# Altium footprint library DIM.PcbLib: 183 footprints (part 4 of 12)
Each footprint in its own frame and in the unit in brackets; x right, y up, seen from the top. Pads: shape width x height; smd on the part's side, far side on the other; paste and mask are expansions set on the pad; w line width, h text height; cw(c..) or ccw(c..) is an arc to the next point about the centre after c.
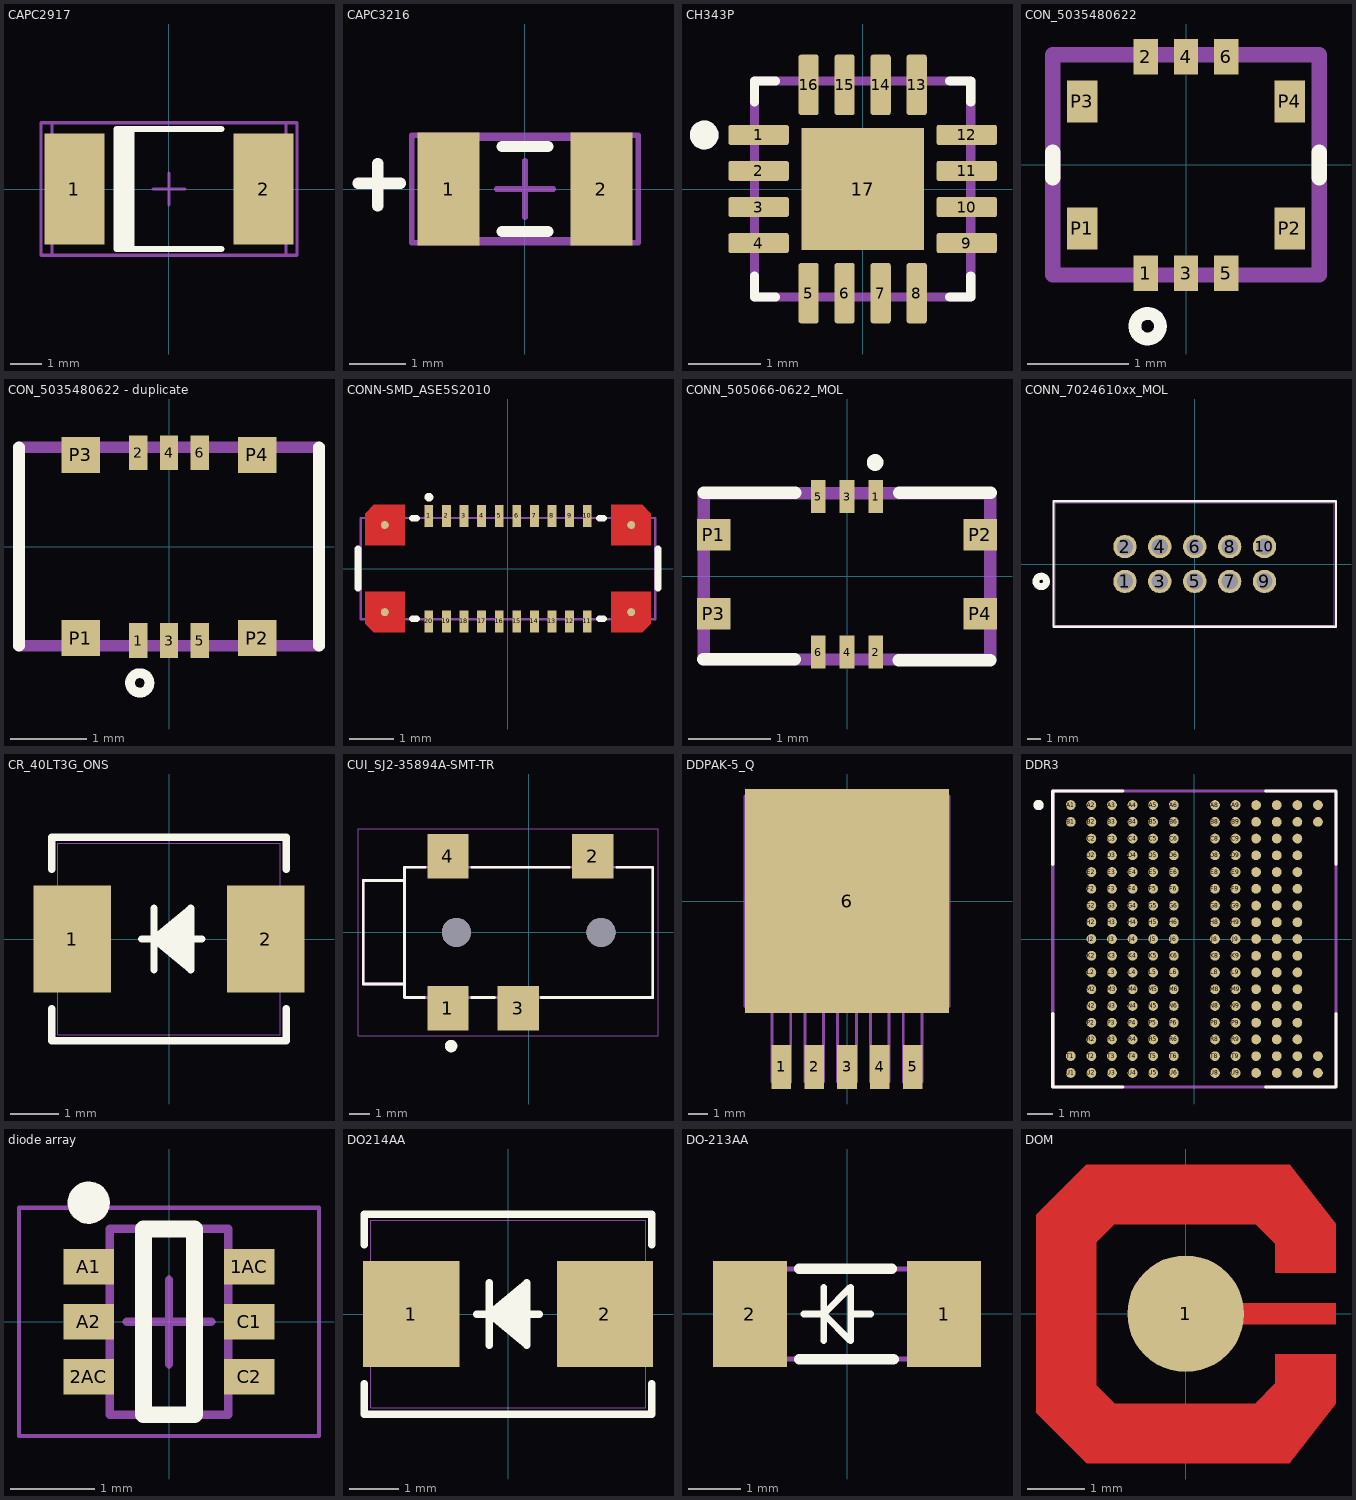
[diagram p3: the footprints below, top view; thin cyan lines are the x and y axes]

## CAPC2917 [mm]
height 4.3
pads (2):
  rect 1.9x3.5 smd: 1(-3,0) 2(3,0)
Top Overlay:
  rectangle: -1.65,-1.9 -1.1,1.9
  lines w0.2: 1.65,-1.9 -1.65,-1.9 -1.65,1.9 1.65,1.9
Mechanical 13:
  lines w0.1: -3.7,-2.1 3.7,-2.1 3.7,2 3.7,2.1 -3.7,2.1 -3.7,-2.1
Mechanical 15:
  lines w0.1: -0.5,0 0.5,0 ; 0,-0.5 0,0.5 ; -4.05,-2.1 4.05,-2.1 4.05,2.1 -4.05,2.1 -4.05,-2.1
3D body: height 4.3, standoff 0, extent -3.8,-2.1 3.8,2.1

## CAPC3216 [mm] "Chip Capacitor, Body 3.2x1.6mm, IPC High Density"
height 1.35
pads (2):
  rect 1.1x2 smd: 1(-1.35,0) 2(1.35,0)
Top Overlay:
  lines w0.2: -2.95,0.1 -2.2,0.1 ; -2.6,-0.3 -2.6,0.45 ; -0.4,-0.75 0.4,-0.75 ; -0.4,0.75 0.4,0.75
Mechanical 13:
  lines w0.1: -1.7,-0.9 -1.7,0.9 1.7,0.9 1.7,-0.9 -1.7,-0.9
Mechanical 15:
  lines w0.1: -0.5,0 0.5,0 ; 0,-0.5 0,0.5 ; -2,-0.95 -2,0.95 2,0.95 2,-0.95 -2,-0.95
3D body "User Library-Chip Capacitor2.STEP": height 1.6, standoff 0, extent -1.6,-0.635 1.6,0.615

## CH343P [mm]
height 0.8
pads (17):
  rrect25% 0.84x0.28 smd mask+0.05: 1(-1.445,0.75) 2(-1.445,0.25) 3(-1.445,-0.25) 4(-1.445,-0.75) 9(1.445,-0.75) 10(1.445,-0.25) 11(1.445,0.25) 12(1.445,0.75)
  rrect25% 0.28x0.84 smd mask+0.05: 5(-0.75,-1.445) 6(-0.25,-1.445) 7(0.25,-1.445) 8(0.75,-1.445) 13(0.75,1.445) 14(0.25,1.445) 15(-0.25,1.445) 16(-0.75,1.445)
  rect 1.7x1.7 smd paste-0.31 mask+0.05: 17(0,0)
Top Overlay:
  circle w0.2: c-2.2,0.75 r0.1
  lines w0.127: -1.5,-1.21 -1.5,-1.5 -1.21,-1.5 ; -1.5,1.21 -1.5,1.5 -1.21,1.5 ; 1.21,-1.5 1.5,-1.5 1.5,-1.21 ; 1.21,1.5 1.5,1.5 1.5,1.21
Mechanical 13:
  circle w0.2: c-2.2,0.75 r0.1
  lines w0.127: -1.5,-1.5 1.5,-1.5 1.5,1.5 -1.5,1.5 -1.5,-1.5
3D body: height 1, standoff 0, extent -1.5,-1.5 1.5,1.5

## CON_5035480622 [mm]
pads (10):
  rect 0.24x0.35 smd: 1(-0.4,-1.075) 2(-0.4,1.075) 3(0,-1.075) 4(0,1.075) 5(0.4,-1.075) 6(0.4,1.075)
  rect 0.3x0.42 smd: P1(-1.03,-0.63) P2(1.03,-0.63) P3(-1.03,0.63) P4(1.03,0.63)
Top Overlay:
  circle w0.127: c-0.381,-1.6 r0.127
  lines w0.152: -1.321,-0.127 -1.321,0.127 ; 1.321,-0.127 1.321,0.127
Mechanical 13:
  lines w0.152: -1.321,-1.092 1.321,-1.092 1.321,1.092 -1.321,1.092 -1.321,-1.092
3D body "5035520622.stp": height 0.56, standoff -0.02, extent -1.339,-1.108 1.321,1.092

## CON_5035480622 - duplicate [mm]
pads (10):
  rect 0.24x0.45 smd: 1(-0.4,-1.225) 2(-0.4,1.225) 3(0,-1.225) 4(0,1.225) 5(0.4,-1.225) 6(0.4,1.225)
  rect 0.5x0.47 smd: P1(-1.15,-1.195) P2(1.15,-1.195) P3(-1.15,1.195) P4(1.15,1.195)
Top Overlay:
  circle w0.127: c-0.381,-1.778 r0.127
  lines w0.152: -1.956,-1.295 -1.956,1.295 ; 1.956,-1.295 1.956,1.295
Mechanical 13:
  lines w0.152: -1.956,-1.295 -1.956,1.295 1.956,1.295 1.956,-1.295 -1.956,-1.295
3D body "5035480622.STEP": height 0.78, standoff 0, extent -1.944,-1.305 1.956,1.295

## CONN-SMD_ASE5S2010 [mm]
pads (24):
  rect 0.2x0.5 smd paste+0 mask+0.05: 1(-1.8,1.2) 2(-1.4,1.2) 3(-1,1.2) 4(-0.6,1.2) 5(-0.2,1.2) 6(0.2,1.2) 7(0.6,1.2) 8(1,1.2) 9(1.4,1.2) 10(1.8,1.2) 11(1.8,-1.2) 12(1.4,-1.2) 13(1,-1.2) 14(0.6,-1.2) 15(0.2,-1.2) 16(-0.2,-1.2) 17(-0.6,-1.2) 18(-1,-1.2) 19(-1.4,-1.2) 20(-1.8,-1.2)
  round 0.18 smd: 21(2.8,0.99) 22(2.8,-0.99) 23(-2.8,-0.99) 24(-2.8,0.99)
Top Layer:
  region: -2.35,1.45 -2.35,0.99 -2.35,0.53 -3.25,0.53 -3.25,1.25 -3.05,1.45
  region: -2.35,-1.45 -3.05,-1.45 -3.25,-1.25 -3.25,-0.53 -2.35,-0.53 -2.35,-0.99
  region: 2.35,1.45 3.05,1.45 3.25,1.25 3.25,0.53 2.35,0.53 2.35,0.99
  region: 2.35,-1.45 2.35,-0.99 2.35,-0.53 3.25,-0.53 3.25,-1.25 3.05,-1.45
Top Overlay:
  circle w0.127: c-1.798,1.623 r0.036
  lines w0.152: -3.41,-0.45 -3.41,0.45 ; -2.17,-1.143 -2.08,-1.143 ; -2.17,1.143 -2.08,1.143 ; 2.08,-1.143 2.17,-1.143 ; 2.08,1.143 2.17,1.143 ; 3.41,-0.45 3.41,0.45
Mechanical 13:
  lines w0.051: -3.35,-1.15 -3.35,1.15 3.35,1.15 3.35,-1.15 -3.35,-1.15
3D body: height 2, standoff 0, extent -3.35,-1.15 3.35,1.15

## CONN_505066-0622_MOL [mil]
pads (10):
  rect 7x16 smd: 1(13.78,38.4) 2(13.78,-36.4) 3(0,38.4) 4(0,-36.4) 5(-13.78,38.4) 6(-13.78,-36.4)
  rect 16x15 smd: P1(-64.17,20) P2(64.17,20) P3(-64.17,-18) P4(64.17,-18)
Top Overlay:
  circle w5: c13.5,54.8 r1.5
  lines w6: -69.2,-39.9 -25.2,-39.9 ; -69,40.2 -25,40.2 ; 25,-40.3 69,-40.3 ; 25.2,40.2 69.2,40.2
Mechanical 13:
  lines w6: -69,-40 -69,40 69,40 69,-40 -69,-40
3D body "step_temp.STEP": height 22.83, standoff 0, extent -68.9,-39.37 68.9,39.37

## CONN_7024610xx_MOL [mil]
pads (10):
  round 67 / inner round 60 / far side round 67 hole 47 paste-33.5 mask+0: 1(-200,-50) 2(-200,50) 3(-100,-50) 4(-100,50) 5(0,-50) 6(0,50) 7(100,-50) 8(100,50) 9(200,-50) 10(200,50)
Top Overlay:
  circle w20: c-440,-50 r15
  lines w6: -405,-180 -405,180 405,180 405,-180 -405,-180
Bottom Overlay:
  circle w20: c-440,-50 r15
Mechanical 13:
  circle w20: c-200,-50 r15
  lines w1: -400,-175 -400,175 400,175 400,-175 -400,-175
3D body "702461004.stp": height 376.18, standoff -123.78, extent -399.99,-174.99 400.01,175

## CR_40LT3G_ONS [mil]
pads (2):
  rect 63x87 smd paste+0 mask+4: 1(-78.74,0) 2(78.74,0)
Top Overlay:
  lines w6: -95.5,-56.6 -95.5,-83 95.5,-83 95.5,-56.6 ; -95.5,56.6 -95.5,83 95.5,83 95.5,56.6 ; -22.24,0 26.66,0 ; -12.24,-25 -12.24,25 ; 17.76,-20 -12.24,0 ; 17.76,-15 -12.24,0 ; 17.76,-10 -12.24,0 ; 17.76,-5 -12.24,0 ; 17.76,5 -12.24,0 ; 17.76,10 -12.24,0 ; 17.76,15 -12.24,0 ; 17.76,20 -12.24,0 ; -12.24,0 17.76,25 17.76,-25 -12.24,0
Mechanical 13:
  lines w1: -22.24,0 27.76,0 ; -12.24,-25 -12.24,25 ; 17.76,-25 -12.24,0 ; 17.76,-20 -12.24,0 ; 17.76,-15 -12.24,0 ; 17.76,-10 -12.24,0 ; 17.76,-5 -12.24,0 ; 17.76,5 -12.24,0 ; 17.76,10 -12.24,0 ; 17.76,15 -12.24,0 ; 17.76,20 -12.24,0 ; 17.76,25 -12.24,0 ; -90.5,-78 90.5,-78 90.5,78 -90.5,78 -90.5,-78
3D body "CR_40LT3G_ONS.step": height 99.02, standoff 0, extent -90.51,-77.99 90.51,77.99

## CUI_SJ2-35894A-SMT-TR [mm]
pads (6):
  rect 2x2.15 smd: 1(-3.9,-3.675) 2(3.1,3.675) 3(-0.5,-3.675) 4(-3.9,3.675)
  round 1.4 hole 1.4 unplated: ""(-3.5,0) ""(3.5,0)
Top Overlay:
  circle w0.3: c-3.75,-5.5 r0.15
  lines w0.127: -5.05,-3.15 -6,-3.15 -6,-2.5 ; -5,3.15 -6,3.15 -6,2.5 ; -2.75,-3.15 -1.65,-3.15 ; -2.75,3.15 1.95,3.15 ; 0.6,-3.15 6,-3.15 6,3.15 4.25,3.15 ; -6,-2.5 -8,-2.5 -8,2.5 -6,2.5 ; -6,-2.5 -6,2.5
Mechanical 13:
  lines w0.127: -6,-2.5 -8,-2.5 -8,2.5 -6,2.5 ; -6,-3.15 -6,3.15 6,3.15 6,-3.15 -6,-3.15
Mechanical 15:
  lines w0.05: -8.25,-5 6.25,-5 6.25,5 -8.25,5 -8.25,-5

## DDPAK-5_Q [mil]
pads (6):
  rect 40x90 smd: 1(-134,-339) 2(-67,-339) 3(0,-339) 4(67,-339) 5(134,-339)
  rect 417x458 smd: 6(0,0)
Mechanical 13:
  lines w6: -208,-215 -208,215 208,215 208,-215 -208,-215 ; -153,-370 -115,-370 -115,-215 -153,-215 -153,-370 ; -86,-370 -48,-370 -48,-215 -86,-215 -86,-370 ; -19,-370 19,-370 19,-215 -19,-215 -19,-370 ; 48,-370 86,-370 86,-215 48,-215 48,-370 ; 115,-370 153,-370 153,-215 115,-215 115,-370

## DDR3 [mm]
pads (178):
  round 0.38 smd: A1(-4.8,5.2) A2(-4,5.2) A3(-3.2,5.2) A4(-2.4,5.2) A5(-1.6,5.2) A6(-0.8,5.2) A8(0.8,5.2) A9(1.6,5.2) A10(2.4,5.2) A11(3.2,5.2) A12(4,5.2) A13(4.8,5.2) B1(-4.8,4.55) B2(-4,4.55) B3(-3.2,4.55) B4(-2.4,4.55) B5(-1.6,4.55) B6(-0.8,4.55) B8(0.8,4.55) B9(1.6,4.55) B10(2.4,4.55) B11(3.2,4.55) B12(4,4.55) B13(4.8,4.55) C2(-4,3.9) C3(-3.2,3.9) C4(-2.4,3.9) C5(-1.6,3.9) C6(-0.8,3.9) C8(0.8,3.9) C9(1.6,3.9) C10(2.4,3.9) C11(3.2,3.9) C12(4,3.9) D2(-4,3.25) D3(-3.2,3.25) D4(-2.4,3.25) D5(-1.6,3.25) D6(-0.8,3.25) D8(0.8,3.25) D9(1.6,3.25) D10(2.4,3.25) D11(3.2,3.25) D12(4,3.25) E2(-4,2.6) E3(-3.2,2.6) E4(-2.4,2.6) E5(-1.6,2.6) E6(-0.8,2.6) E8(0.8,2.6) E9(1.6,2.6) E10(2.4,2.6) E11(3.2,2.6) E12(4,2.6) F2(-4,1.95) F3(-3.2,1.95) F4(-2.4,1.95) F5(-1.6,1.95) F6(-0.8,1.95) F8(0.8,1.95) F9(1.6,1.95) F10(2.4,1.95) F11(3.2,1.95) F12(4,1.95) G2(-4,1.3) G3(-3.2,1.3) G4(-2.4,1.3) G5(-1.6,1.3) G6(-0.8,1.3) G8(0.8,1.3) G9(1.6,1.3) G10(2.4,1.3) G11(3.2,1.3) G12(4,1.3) H2(-4,0.65) H3(-3.2,0.65) H4(-2.4,0.65) H5(-1.6,0.65) H6(-0.8,0.65) H8(0.8,0.65) H9(1.6,0.65) H10(2.4,0.65) H11(3.2,0.65) H12(4,0.65) J2(-4,0) J3(-3.2,0) J4(-2.4,0) J5(-1.6,0) J6(-0.8,0) J8(0.8,0) J9(1.6,0) J10(2.4,0) J11(3.2,0) J12(4,0) K2(-4,-0.65) K3(-3.2,-0.65) K4(-2.4,-0.65) K5(-1.6,-0.65) K6(-0.8,-0.65) K8(0.8,-0.65) K9(1.6,-0.65) K10(2.4,-0.65) K11(3.2,-0.65) K12(4,-0.65) L2(-4,-1.3) L3(-3.2,-1.3) L4(-2.4,-1.3) L5(-1.6,-1.3) L6(-0.8,-1.3) L8(0.8,-1.3) L9(1.6,-1.3) L10(2.4,-1.3) L11(3.2,-1.3) L12(4,-1.3) M2(-4,-1.95) M3(-3.2,-1.95) M4(-2.4,-1.95) M5(-1.6,-1.95) M6(-0.8,-1.95) M8(0.8,-1.95) M9(1.6,-1.95) M10(2.4,-1.95) M11(3.2,-1.95) M12(4,-1.95) N2(-4,-2.6) N3(-3.2,-2.6) N4(-2.4,-2.6) N5(-1.6,-2.6) N6(-0.8,-2.6) N8(0.8,-2.6) N9(1.6,-2.6) N10(2.4,-2.6) N11(3.2,-2.6) N12(4,-2.6) P2(-4,-3.25) P3(-3.2,-3.25) P4(-2.4,-3.25) P5(-1.6,-3.25) P6(-0.8,-3.25) P8(0.8,-3.25) P9(1.6,-3.25) P10(2.4,-3.25) P11(3.2,-3.25) P12(4,-3.25) R2(-4,-3.9) R3(-3.2,-3.9) R4(-2.4,-3.9) R5(-1.6,-3.9) R6(-0.8,-3.9) R8(0.8,-3.9) R9(1.6,-3.9) R10(2.4,-3.9) R11(3.2,-3.9) R12(4,-3.9) T1(-4.8,-4.55) T2(-4,-4.55) T3(-3.2,-4.55) T4(-2.4,-4.55) T5(-1.6,-4.55) T6(-0.8,-4.55) T8(0.8,-4.55) T9(1.6,-4.55) T10(2.4,-4.55) T11(3.2,-4.55) T12(4,-4.55) T13(4.8,-4.55) U1(-4.8,-5.2) U2(-4,-5.2) U3(-3.2,-5.2) U4(-2.4,-5.2) U5(-1.6,-5.2) U6(-0.8,-5.2) U8(0.8,-5.2) U9(1.6,-5.2) U10(2.4,-5.2) U11(3.2,-5.2) U12(4,-5.2) U13(4.8,-5.2)
Top Overlay:
  circle w0.2: c-6.05,5.2 r0.1
  lines w0.127: -5.5,-2.9 -5.5,-5.75 -2.775,-5.75 ; -5.5,2.9 -5.5,5.75 -2.775,5.75 ; 2.775,-5.75 5.5,-5.75 5.5,-2.9 ; 2.775,5.75 5.5,5.75 5.5,2.9
Mechanical 13:
  circle w0.2: c-6.05,5.2 r0.1
  lines w0.127: -5.5,-5.75 5.5,-5.75 5.5,5.75 -5.5,5.75 -5.5,-5.75

## diode array [mm]
height 1
pads (6):
  rect 0.6x0.42 smd: 1AC(0.95,0.65) 2AC(-0.95,-0.65) A1(-0.95,0.65) A2(-0.95,0) C1(0.95,0) C2(0.95,-0.65)
Top Overlay:
  circle w0.25: c-0.95,1.41 r0.125
  lines w0.2: -0.3,-1.1 -0.3,1.1 0.3,1.1 0.3,-1.1 -0.3,-1.1
Mechanical 13:
  lines w0.1: -0.7,-1.1 -0.7,1.1 0.7,1.1 0.7,-1.1 -0.7,-1.1
Mechanical 15:
  lines w0.05: -1.775,-1.35 -1.775,1.35 1.775,1.35 1.775,-1.35 -1.775,-1.35
  lines w0.1: -0.5,0 0.5,0 ; 0,-0.5 0,0.5
3D body: height 1, standoff 0.1, extent -0.7,-1.1 0.7,1.1

## DO214AA [mil]
pads (2):
  rect 77x85 smd paste+0 mask+4: 1(-77.5,0) 2(77.5,0)
Top Overlay:
  lines w6: -115,-55.6 -115,-80 115,-80 115,-55.6 ; -115,55.6 -115,80 115,80 115,55.6 ; -25,0 25,0 ; -15,-25 -15,25 ; 15,-20 -15,0 ; 15,-15 -15,0 ; 15,-10 -15,0 ; 15,-5 -15,0 ; 15,5 -15,0 ; 15,10 -15,0 ; 15,15 -15,0 ; 15,20 -15,0 ; -15,0 15,-25 15,25 -15,0
Mechanical 13:
  lines w1: -25,0 25,0 ; -15,-25 -15,25 ; 15,-20 -15,0 ; 15,-15 -15,0 ; 15,-10 -15,0 ; 15,-5 -15,0 ; 15,5 -15,0 ; 15,10 -15,0 ; 15,15 -15,0 ; 15,20 -15,0 ; -15,0 15,-25 15,25 -15,0 ; -110,-75 -110,75 110,75 110,-75 -110,-75
3D body "DIODE_DO214AA_MBRS_VIS.step": height 95.98, standoff 0, extent -110,-75 110,75

## DO-213AA [mm]
pads (2):
  rect 1.4x2 smd: 1(1.84,0) 2(-1.84,0)
Top Overlay:
  lines w0.127: -0.82,0 -0.439,0 ; -0.439,0.508 -0.439,0 ; 0.069,0 0.45,0 ; -0.439,0 0.069,0.508 0.069,-0.508 -0.439,0 ; -0.439,0 -0.439,-0.508 -0.439,0
  lines w0.2: -0.9,-0.86 0.88,-0.86 ; -0.9,0.86 0.85,0.86
Mechanical 13:
  lines w0.1: -1.855,-0.85 -1.855,0.85 1.855,0.85 1.855,-0.85 -1.855,-0.85
3D body: height 1.6, standoff 0.1, extent 1.46,-0.748 1.86,0.747
3D body: height 1.6, standoff -0.1, extent -1.84,-0.847 -1.44,0.847
3D body: height 1.5, standoff 0, extent -1.49,-0.73 1.51,0.764

## DOM [mm]
pads (1):
  round 2.03 smd mask+0.051: 1(0,0)
Top Layer:
  rectangle: 0.73,-0.19 2.61,0.19
  rectangle: 1.55,0.71 2.61,1.224
  rectangle: 1.55,-1.214 2.61,-0.7
  region: 2.61,1.22 2.61,1.565 1.803,2.59 1.205,1.565 1.55,1.22
  region: 1.803,-1.56 -1.234,-1.56 -1.55,-1.244 -1.55,1.244 -1.244,1.55 1.803,1.55 1.803,2.59 -1.728,2.59 -2.6,1.718 -2.6,-1.718 -1.718,-2.6 1.803,-2.6
  region: 2.61,-1.22 2.61,-1.565 1.803,-2.59 1.205,-1.565 1.55,-1.22